# Altium schematic symbol library Symbols.SchLib: 58 symbols
Pins are listed as number, name and electrical type; pins without a type are passive.

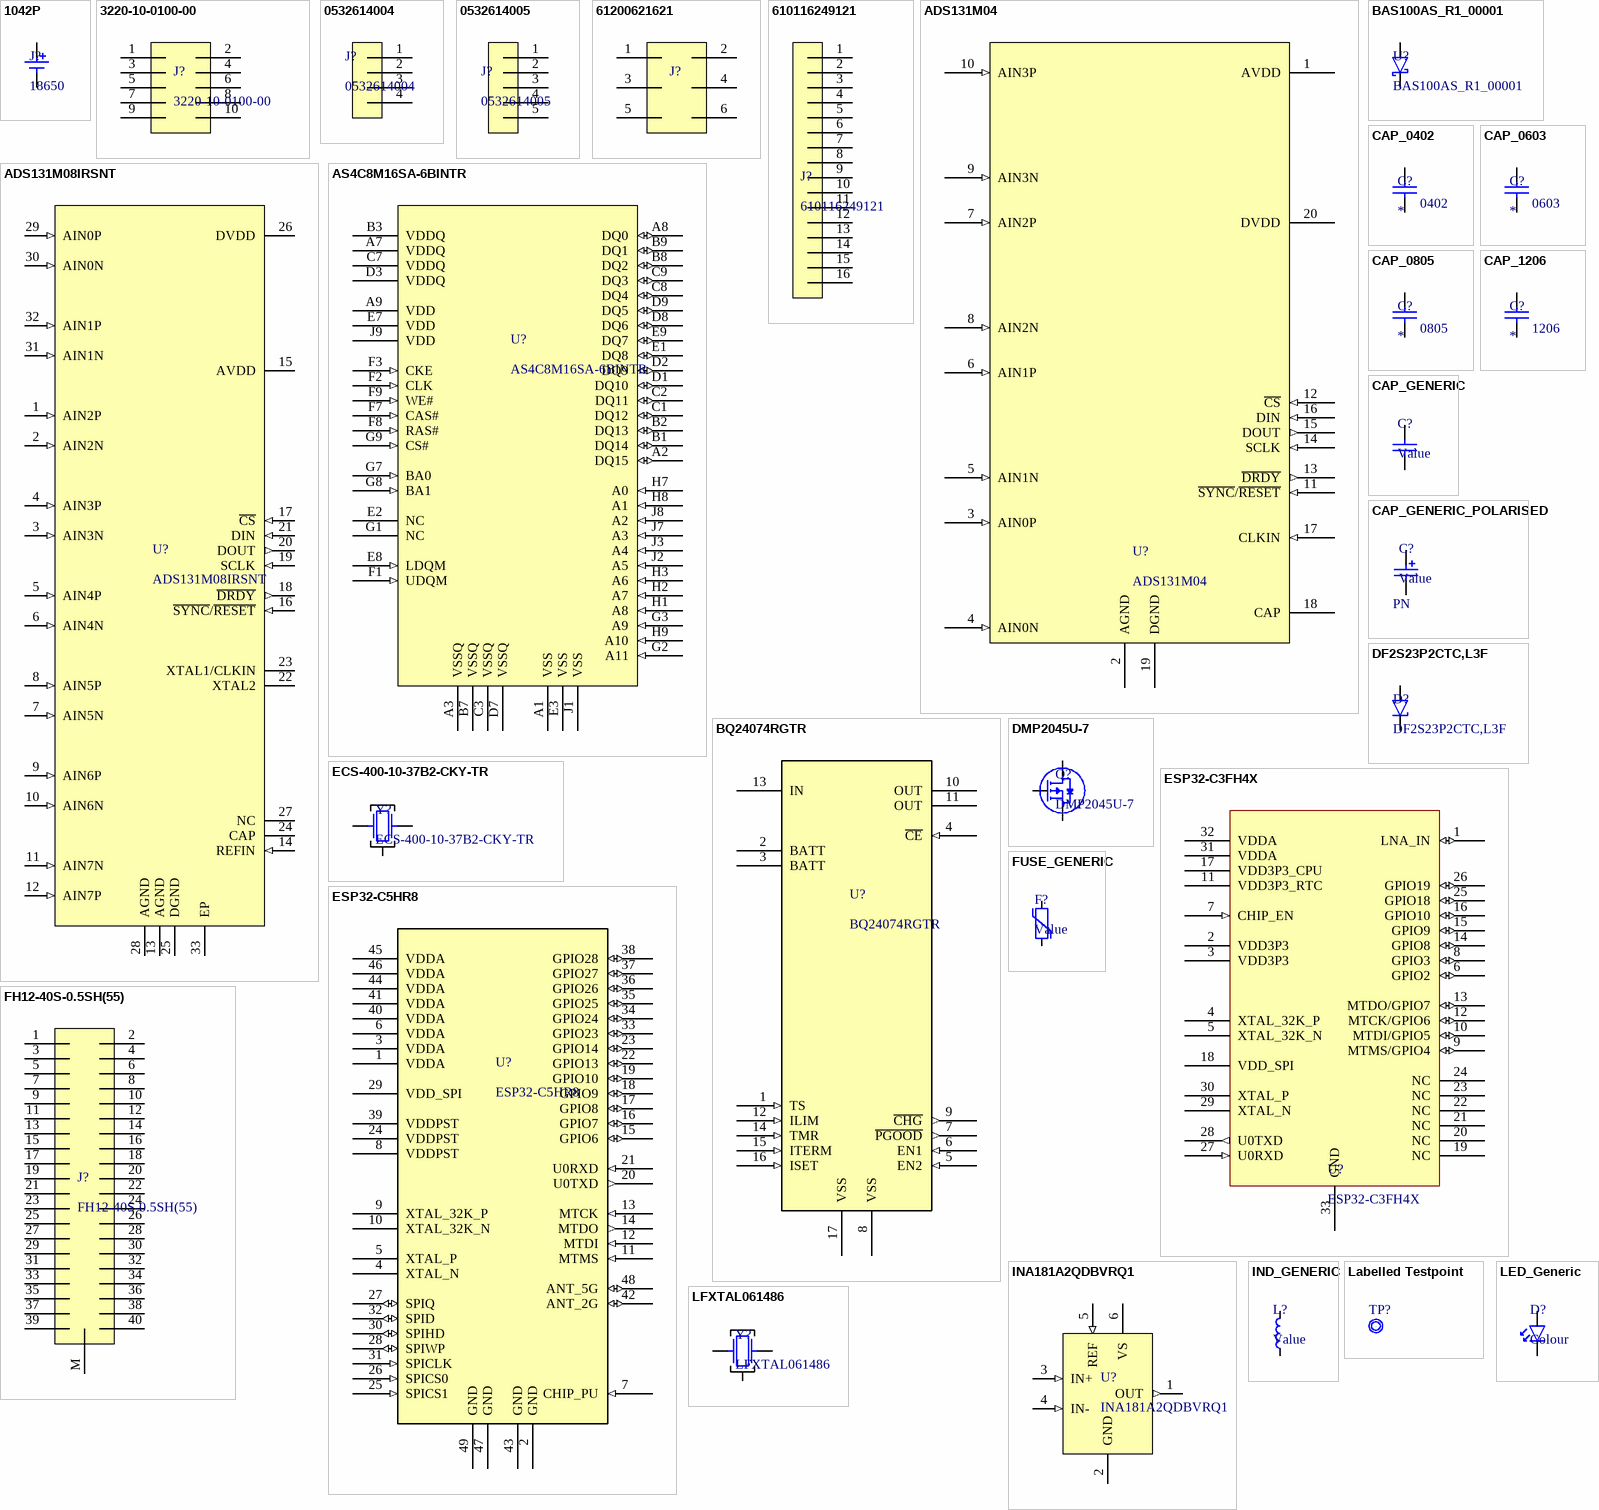
[diagram p0: symbols 1042P to LFXTAL061486]

## 1042P
designator J?, comment 18650
Battery Holder (Open) 18650 1 Cell SMD (SMT) Tab; Supplier 1: DigiKey; Supplier Part Number 1: 36-1042P-ND
footprint 1042P (BATTERY HOLDER 18650 SMD)
pins: 1 (power), 2 (power)

## 3220-10-0100-00
designator J?
Connector Header Through Hole 10 position 0.050" (1.27mm); Supplier 1: DigiKey; Supplier Part Number 1: 1175-1627-ND
footprint 3220-10-0100-00 (Connector Header Through Hole 10 position 0.050" (1.27mm))
pins: 1 2, 2, 3 2, 4 2, 5 2, 6 2, 7 2, 8 2, 9 2, 10 2

## 0532614004
designator J?
Connector Header Surface Mount, Right Angle 4 position 0.049" (1.25mm); Supplier 1: Arrow Electronics; Supplier Part Number 1: 0532614004
footprint 0532614004 (Connector Header Surface Mount, Right Angle 4 position 0.049" (1.25mm))
pins: 1 2, 2, 3 2, 4 2

## 0532614005
designator J?
Connector Header Surface Mount, Right Angle 5 position 0.049" (1.25mm); Supplier 1: DigiKey; Supplier Part Number 1: 900-0532614005DKR-ND
footprint 0532614005 (Connector Header Surface Mount, Right Angle 5 position 0.049" (1.25mm))
pins: 1 2, 2, 3 2, 4 2, 5 2

## 61200621621
designator J?
Connector Header Through Hole 6 position 0.100" (2.54mm); Supplier 1: Newark; Supplier Part Number 1: 61200621621
footprint 61200621621
pins: 1 2, 2, 3 2, 4 2, 5 2, 6 2

## 610116249121
designator J?
Connector Header Surface Mount, Right Angle 16 position 0.100" (2.54mm); Supplier 1: DigiKey; Supplier Part Number 1: 732-6072-6-ND
footprint 610116249121 (Connector Header Surface Mount, Right Angle 16 position 0.100" (2.54mm))
pins: 1 2, 2, 3 2, 4 2, 5 2, 6 2, 7 3, 8 3, 9 3, 10 3, 11 3, 12 3, 13 3, 14 3, 15 3, 16 3

## ADS131M04
designator U?
24 Bit Analog to Digital Converter 4 Input 4 Sigma-Delta 20-TSSOP; Supplier 1: DigiKey; Supplier Part Number 1: 296-ADS131M04IPWRCT-ND
footprint ADS131M04IPW (TSOP, 20-Leads, Body 6.50x4.40mm, Pitch 0.65mm, IPC Medium Density)
pins: 1 AVDD (power), 2 AGND (power), 3 AIN0P (in), 4 AIN0N (in), 5 AIN1N (in), 6 AIN1P (in), 7 AIN2P (in), 8 AIN2N (in), 9 AIN3N (in), 10 AIN3P (in), 11 ~{SYNC}/~{RESET} (in), 12 ~{CS} (in), 13 ~{DRDY} (out), 14 SCLK (in), 15 DOUT (out), 16 DIN (in), 17 CLKIN (in), 18 CAP, 19 DGND (power), 20 DVDD (power)

## ADS131M08IRSNT
designator U?
24 Bit Analog to Digital Converter 8 Input 8 Sigma-Delta 32-QFN (4x4); Supplier 1: DigiKey; Supplier Part Number 1: 296-ADS131M08IRSNTCT-ND
footprint ADS131M08IRSNT (PQFN, 32-Leads, Body 4.00x4.00mm, Pitch 0.40mm, Thermal Pad 2.80x2.80mm, IPC Medium Density)
pins: 1 AIN2P (in), 2 AIN2N (in), 3 AIN3N (in), 4 AIN3P (in), 5 AIN4P (in), 6 AIN4N (in), 7 AIN5N (in), 8 AIN5P (in), 9 AIN6P (in), 10 AIN6N (in), 11 AIN7N (in), 12 AIN7P (in), 13 AGND (power), 14 REFIN (in), 15 AVDD (power), 16 ~{SYNC}/~{RESET} (in), 17 ~{CS} (in), 18 ~{DRDY} (out), 19 SCLK (in), 20 DOUT (out), 21 DIN (in), 22 XTAL2, 23 XTAL1/CLKIN, 24 CAP, 25 DGND (power), 26 DVDD (power), 27 NC, 28 AGND (power), 29 AIN0P (in), 30 AIN0N (in), 31 AIN1N (in), 32 AIN1P (in), 33 EP (power)

## AS4C8M16SA-6BINTR
designator U?
SDRAM Memory IC 128Mbit Parallel 166 MHz 5 ns 54-TFBGA (8x8); Supplier 1: DigiKey; Supplier Part Number 1: 1450-AS4C8M16SA-6BINCT-ND
footprint AS4C8M16SA-6BINTR (BGA, 54-Leads, Body 8.00x8.00mmx1.20mm, Pitch 0.80mm)
ibis AS4C8M16SA-6BIN_8Mx16_SDR_3_3V (Model Description)
pins: A1 VSS (power), A2 DQ15 (io), A3 VSSQ (power), A7 VDDQ (power), A8 DQ0 (io), A9 VDD (power), B1 DQ14 (io), B2 DQ13 (io), B3 VDDQ (power), B7 VSSQ (power), B8 DQ2 (io), B9 DQ1 (io), C1 DQ12 (io), C2 DQ11 (io), C3 VSSQ (power), C7 VDDQ (power), C8 DQ4 (io), C9 DQ3 (io), D1 DQ10 (io), D2 DQ9 (io), D3 VDDQ (power), D7 VSSQ (power), D8 DQ6 (io), D9 DQ5 (io), E1 DQ8 (io), E2 NC (hiz), E3 VSS (power), E7 VDD (power), E8 LDQM (in), E9 DQ7 (io), F1 UDQM (in), F2 CLK (in), F3 CKE (in), F7 CAS# (in), F8 RAS# (in), F9 WE# (in), G1 NC (hiz), G2 A11 (in), G3 A9 (in), G7 BA0 (in), G8 BA1 (in), G9 CS# (in), H1 A8 (in), H2 A7 (in), H3 A6 (in), H7 A0 (in), H8 A1 (in), H9 A10 (in), J1 VSS (power), J2 A5 (in), J3 A4 (in), J7 A3 (in), J8 A2 (in), J9 VDD (power)

## BAS100AS_R1_00001
designator U?
DIODE SCHOTTKY 100V 500MA SOD123; Supplier 1: DigiKey; Supplier Part Number 1: 3757-BAS100AS_R1_00001CT-ND
footprint BAS100AS_R1_00001 (Diode 100 V 500mA Surface Mount SOD-123)
pins: 1 a, 2

## BQ24074RGTR
designator U?
Charger IC Lithium Ion 16-VQFN (3x3); Supplier 1: DigiKey; Supplier Part Number 1: 296-38873-1-ND
footprint BQ24074RGTR (PQFN, 16-Leads, Body 3.00x3.00mm, Pitch 0.50mm, Thermal Pad 1.68x1.68mm, IPC Medium Density)
pins: 1 TS (in), 2 BATT (power), 3 BATT (power), 4 ~{CE} (in), 5 EN2 (in), 6 EN1 (in), 7 ~{PGOOD} (out), 8 VSS (power), 9 ~{CHG} (out), 10 OUT (power), 11 OUT (power), 12 ILIM (in), 13 IN (power), 14 TMR (in), 15 ITERM (in), 16 ISET (in), 17 VSS (power)

## CAP_0402
designator C?  Footprint: 0402
0402 SMD Capacitor
footprint CAP_0402_B (Chip Capacitor, 2-Leads, Body 1.00x0.50mm, IPC Medium Density)
footprint CAP_0402_A (Chip Capacitor, 2-Leads, Body 1.00x0.50mm, IPC Low Density)
pins: 1, 2

## CAP_0603
designator C?  Footprint: 0603
0603 SMD Capacitor
footprint CAP_0603_B (Chip Capacitor, 2-Leads, Body 1.60x0.80mm, IPC Medium Density)
footprint CAP_0603_A (Chip Capacitor, 2-Leads, Body 1.60x0.80mm, IPC Low Density)
pins: 1, 2

## CAP_0805
designator C?  Footprint: 0805
0805 SMD Capacitor
footprint CAP_0805_B (Chip Capacitor, 2-Leads, Body 2.00x1.25mm, IPC Medium Density)
footprint CAP_0805_A (Chip Capacitor, 2-Leads, Body 2.00x1.25mm, IPC Low Density)
pins: 1, 2

## CAP_1206
designator C?  Footprint: 1206
1206 SMD Capacitor
footprint CAP_1206_B (Chip Capacitor, 2-Leads, Body 3.20x1.50mm, IPC Medium Density)
footprint CAP_1206_A (Chip Capacitor, 2-Leads, Body 3.20x1.50mm, IPC Low Density)
pins: 1, 2

## CAP_GENERIC
designator C?, comment Value
Generic capacitor symbol; Tolerance: *; Rating: *
footprint CAP_0402_B (Chip Capacitor, 2-Leads, Body 1.00x0.50mm, IPC Medium Density)
footprint CAP_0603_B (Chip Capacitor, 2-Leads, Body 1.60x0.80mm, IPC Medium Density)
footprint CAP_0805_B (Chip Capacitor, 2-Leads, Body 2.00x1.25mm, IPC Medium Density)
footprint CAP_1206_B (Chip Capacitor, 2-Leads, Body 3.20x1.50mm, IPC Medium Density)
pins: 1, 2

## CAP_GENERIC_POLARISED
designator C?, comment Value  Part Number: PN
Generic polarised capacitor symbol
pins: 1, 2

## DF2S23P2CTC,L3F
designator D?
35.7V Clamp 14A (8/20µs) Ipp Tvs Diode Surface Mount CST2C; Supplier 1: Avnet; Supplier Part Number 1: DF2S23P2CTC,L3F
footprint DF2S23P2CTC,L3F (DFN, 2-Leads, Body 1.60x0.80mm, Pitch 1.15mm, IPC Medium Density)
pins: 1 a, 2

## DMP2045U-7
designator Q?
P-Channel 20 V 4.3A (Ta) 800mW (Ta) Surface Mount SOT-23-3; Supplier 1: DigiKey; Supplier Part Number 1: DMP2045U-7DICT-ND
footprint DMP2045U-7 (SOT23, 3-Leads, Body 2.90x2.40mm, Pitch 0.90mm, IPC Medium Density)
pins: 1 G, 2 S, 3 D

## ECS-400-10-37B2-CKY-TR
designator Y?
40 MHz ±10ppm Crystal 10pF 40 Ohms 4-SMD, No Lead; Supplier 1: Future Electronics; Supplier Part Number 1: ECS-400-10-37B2-CKY-TR
footprint ECS-400-10-37B2-CKY-TR
pins: 1 IO, 2 GND, 3 IO, 4 GND

## ESP32-C3FH4X
designator U?
IC RF TxRx + MCU Bluetooth, WiFi 802.11b/g/n, Bluetooth v5.0 32-VFQFN Exposed Pad; Supplier 1: DigiKey; Supplier Part Number 1: 1965-ESP32-C3FH4XCT-ND
footprint ESP32-C3FH4X (PQFN, 32-Leads, Body 5.00x5.00mm, Pitch 0.50mm, Thermal Pad 3.70x3.70mm, IPC Medium Density)
pins: 1 LNA_IN (io), 2 VDD3P3 (power), 3 VDD3P3 (power), 4 XTAL_32K_P, 5 XTAL_32K_N, 6 GPIO2 (io), 7 CHIP_EN (in), 8 GPIO3 (io), 9 MTMS/GPIO4 (io), 10 MTDI/GPIO5 (io), 11 VDD3P3_RTC (power), 12 MTCK/GPIO6 (io), 13 MTDO/GPIO7 (io), 14 GPIO8 (io), 15 GPIO9 (io), 16 GPIO10 (io), 17 VDD3P3_CPU (power), 18 VDD_SPI (power), 19 NC, 20 NC, 21 NC, 22 NC, 23 NC, 24 NC, 25 GPIO18 (io), 26 GPIO19 (io), 27 U0RXD (in), 28 U0TXD (out), 29 XTAL_N, 30 XTAL_P, 31 VDDA (power), 32 VDDA (power), 33 GND (power)

## ESP32-C5HR8
designator U?
IC RF TxRx + MCU Bluetooth, WiFi 802.11b/g/n/ax, Bluetooth v5.0 2.4GHz, 5GHz 48-VFQFN Exposed Pad; Supplier 1: DigiKey; Supplier Part Number 1: 1904-ESP32-C5HR8CT-ND
footprint ESP32-C5HR8
pins: 1 VDDA (power), 2 GND (power), 3 VDDA (power), 4 XTAL_N, 5 XTAL_P, 6 VDDA (power), 7 CHIP_PU (in), 8 VDDPST (power), 9 XTAL_32K_P, 10 XTAL_32K_N, 11 MTMS (in), 12 MTDI (in), 13 MTCK (in), 14 MTDO (out), 15 GPIO6 (io), 16 GPIO7 (io), 17 GPIO8 (io), 18 GPIO9 (io), 19 GPIO10 (io), 20 U0TXD (out), 21 U0RXD (in), 22 GPIO13 (io), 23 GPIO14 (io), 24 VDDPST (power), 25 SPICS1 (in), 26 SPICS0 (in), 27 SPIQ (io), 28 SPIWP (io), 29 VDD_SPI (power), 30 SPIHD (io), 31 SPICLK (in), 32 SPID (io), 33 GPIO23 (io), 34 GPIO24 (io), 35 GPIO25 (io), 36 GPIO26 (io), 37 GPIO27 (io), 38 GPIO28 (io), 39 VDDPST (power), 40 VDDA (power), 41 VDDA (power), 42 ANT_2G (io), 43 GND (power), 44 VDDA (power), 45 VDDA (power), 46 VDDA (power), 47 GND (power), 48 ANT_5G (io), 49 GND (power)

## FH12-40S-0.5SH(55)
designator J?
40 Position FFC, FPC Connector Contacts, Bottom 0.020" (0.50mm) Surface Mount, Right Angle; Supplier 1: Future Electronics; Supplier Part Number 1: FH12-40S-0.5SH(55)
footprint FH12-40S-0.5SH(55) (40 Position FFC, FPC Connector Contacts, Bottom 0.020" (0.50mm) Surface Mount, Right Angle)
pins: 1 2, 2, 3 2, 4 2, 5 2, 6 2, 7 3, 8 3, 9 3, 10 3, 11 3, 12 3, 13 3, 14 3, 15 3, 16 3, 17, 18 3, 19 3, 20 3, 21 5, 22 5, 23 5, 24 5, 25 5, 26 5, 27 5, 28 5, 29 5, 30 5, 31 5, 32 5, 33 5, 34 5, 35 5, 36 5, 37 5, 38 5, 39 5, 40 5, M 5

## FUSE_GENERIC
designator F?, comment Value
Generic Fuse Symbol
pins: 1 a, 2 a

## INA181A2QDBVRQ1
designator U?
Current Sense Amplifier 1 Circuit Rail-to-Rail SOT-23-6; Supplier 1: DigiKey; Supplier Part Number 1: 296-INA181A2QDBVRQ1CT-ND
footprint INA181A2QDBVRQ1 (SOT23, 6-Leads, Body 2.90x2.80mm, Pitch 0.95mm, IPC Medium Density)
pins: 1 OUT (out), 2 GND (power), 3 IN+ (in), 4 IN- (in), 5 REF (in), 6 VS (power)

## IND_GENERIC
designator L?, comment Value
Generic inductor symbol
pins: 1 a, 2 a

## Labelled Testpoint
designator TP?, comment Net  (value not drawn)
Symbol for a labelled testpoint
footprint Labelled Testpoint (2mm Diameter testpoint with silkscreen for labelling)
pins: 1

## LED_Generic
designator D?, comment Colour
pins: 1, 2

## LFXTAL061486
designator Y?
8.192 MHz ±30ppm Crystal 10pF 150 Ohms 4-SMD, No Lead; Supplier 1: DigiKey; Supplier Part Number 1: 1923-LFXTAL061486CT-ND
footprint LFXTAL061486 (8.192 MHz ±30ppm Crystal 10pF 150 Ohms 4-SMD, No Lead)
pins: 1 IO, 2 GND, 3 IO, 4 GND

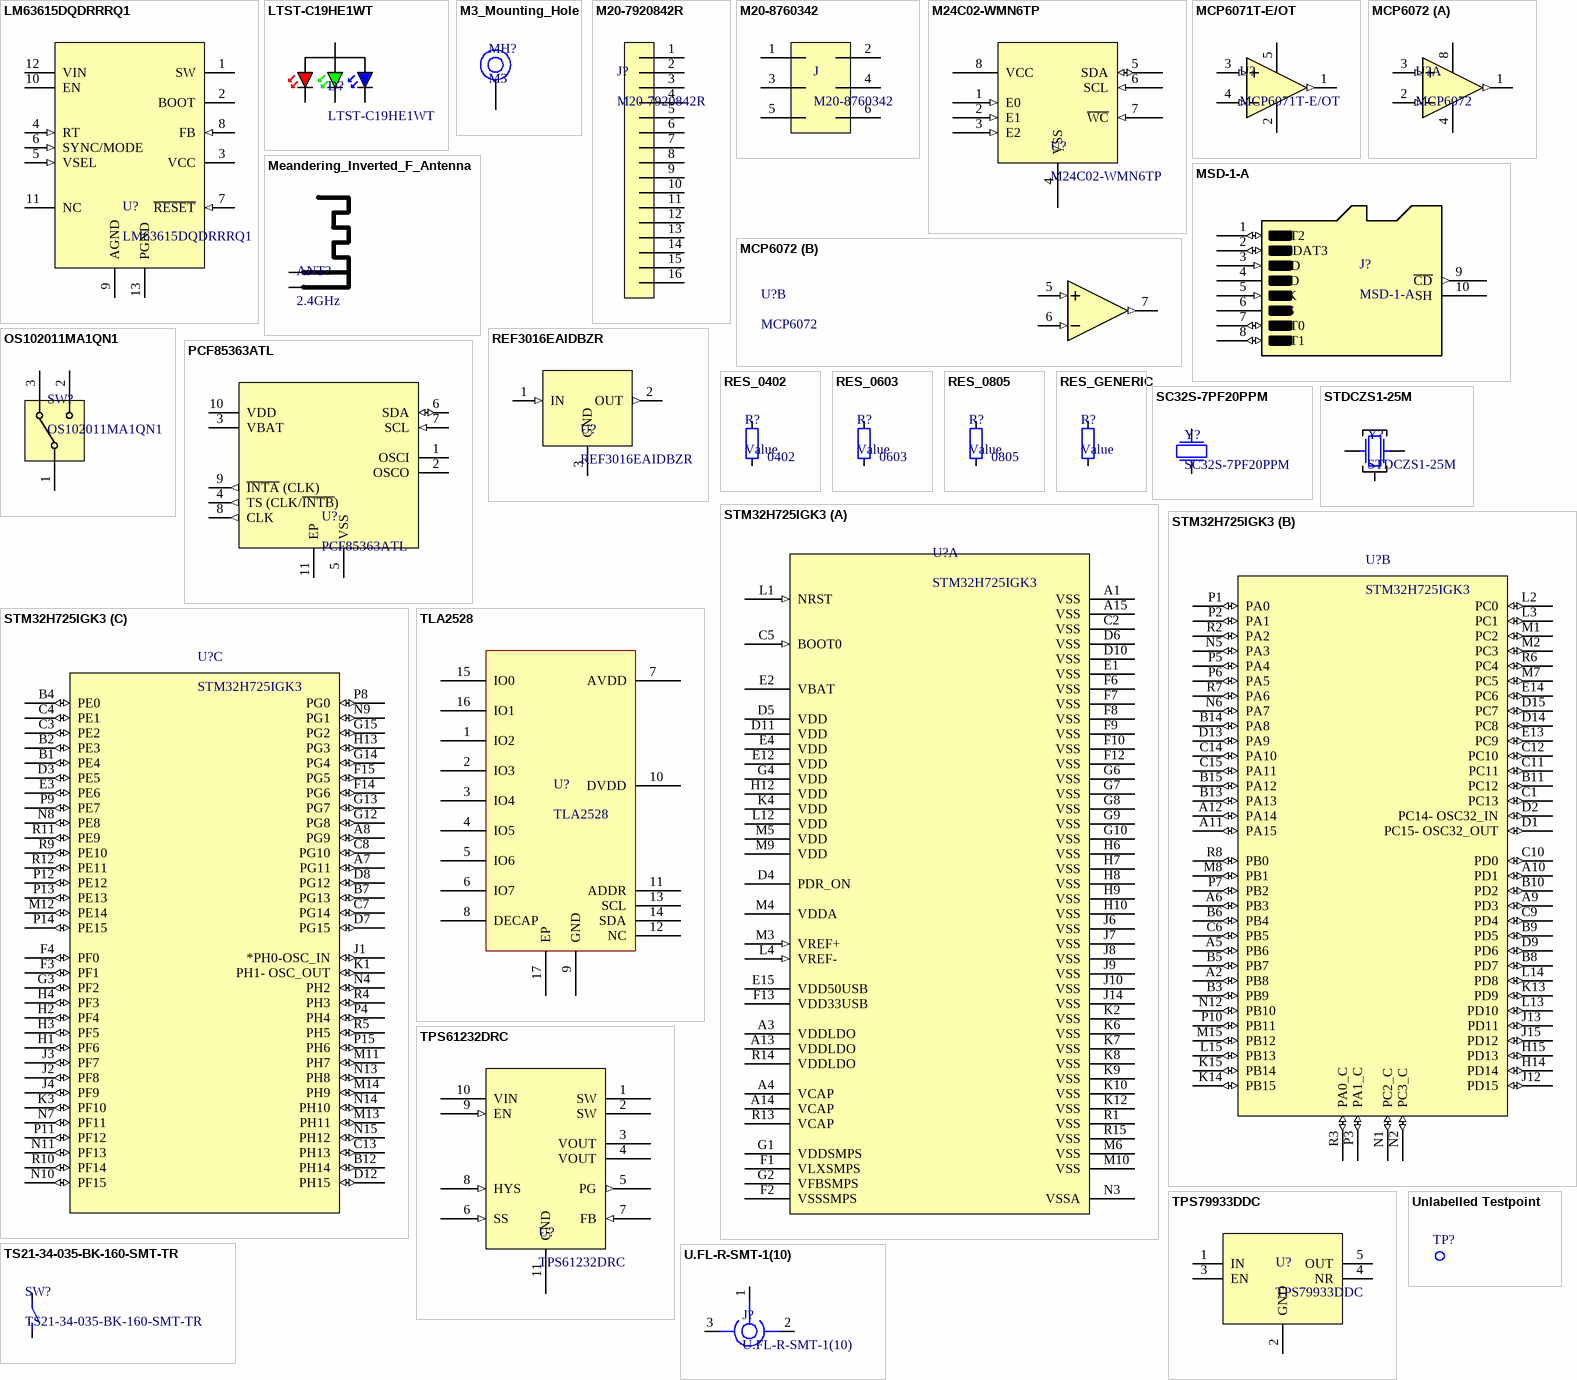
[diagram p1: symbols LM63615DQDRRRQ1 to Unlabelled Testpoint]

## LM63615DQDRRRQ1
designator U?
Buck Switching Regulator IC Positive Adjustable 1V 1 Output 1.5A 12-WFDFN Exposed Pad; Supplier 1: DigiKey; Supplier Part Number 1: 296-LM63615DQDRRRQ1DKR-ND
footprint LM63615DQDRRRQ1 (SON, 12-Leads, Body 3.00x3.00mm, Pitch 0.50mm, Thermal Pad 2.50x1.30mm, IPC Medium Density)
pins: 1 SW (power), 2 BOOT (power), 3 VCC (power), 4 RT (in), 5 VSEL (in), 6 SYNC/MODE (in), 7 ~{RESET} (in), 8 FB (in), 9 AGND (power), 10 EN (power), 11 NC, 12 VIN (power), 13 PGND (power)

## LTST-C19HE1WT
designator D?
Red, Green, Blue (RGB) 624nm Red, 525nm Green, 470nm Blue LED Indication - Discrete 2.1V Red, 3.35V Green, 3.35V Blue 0606 (1616 Metric); Supplier 1: Arrow Electronics; Supplier Part Number 1: LTST-C19HE1WT
footprint LTST-C19HE1WT (Red, Green, Blue (RGB) 624nm Red, 525nm Green, 470nm Blue LED Indication - Discrete 2.1V Red, 3.35V Green, 3.35V Blue 0606 (1616 Metric))
pins: 1, 2, 3, 4

## M3_Mounting_Hole
designator MH?, comment M3
M3 Mounting Hole
footprint M3_Mounting_Hole (Mounting Hole for M3)
pins: 1

## M20-7920842R
designator J?
16 Position Receptacle Connector 0.100" (2.54mm) Surface Mount, Right Angle Gold; Supplier 1: DigiKey; Supplier Part Number 1: 952-3179-1-ND
footprint M20-7920842R (16 Position Receptacle Connector 0.100" (2.54mm) Surface Mount, Right Angle Gold)
pins: 1 2, 2, 3 2, 4 2, 5 2, 6 2, 7 3, 8 3, 9 3, 10 3, 11 3, 12 3, 13 3, 14 3, 15 3, 16 3

## M20-8760342
designator J
Connector Header Surface Mount 6 position 0.100" (2.54mm); Supplier 1: DigiKey; Supplier Part Number 1: 952-1922-ND
footprint M20-8760342 (Connector Header Surface Mount 6 position 0.100" (2.54mm))
footprint M20-8760342 (Connector Header Surface Mount 6 position 0.100" (2.54mm))
pins: 1 2, 2, 3 2, 4 2, 5 2, 6 2

## M24C02-WMN6TP
designator U?
IC EEPROM 2KBIT I2C 400KHZ 8SOIC; Supplier 1: Arrow Electronics; Supplier Part Number 1: M24C02-WMN6TP
footprint M24C02-WMN6TP (SOIC, 8-Leads, Body 4.90x3.90mm, Pitch 1.27mm, IPC Medium Density)
pins: 1 E0 (in), 2 E1 (in), 3 E2 (in), 4 VSS (power), 5 SDA (io), 6 SCL (in), 7 ~{WC} (in), 8 VCC (power)

## MCP6071T-E/OT
designator U?
Standard (General Purpose) Amplifier 1 Circuit Rail-to-Rail SOT-23-5; Supplier 1: Arrow Electronics; Supplier Part Number 1: MCP6071T-E/OT
footprint MCP6071T-E/OT (SOT23, 5-Leads, Body 2.90x2.70mm, Pitch 0.95mm, IPC Medium Density)
pins: 1 VOUT (out), 2 VSS (power), 3 VIN+ (in), 4 VIN- (in), 5 VDD (power)

## MCP6072
designator U?
IC OPAMP GP 2 CIRCUIT 8SOIC; Supplier 1: Avnet; Supplier Part Number 1: MCP6072-E/SN
part A pins: 1 VOUTA (out), 2 VINA- (in), 3 VINA+ (in), 4 VSS (power), 8 VDD (power)
part B pins: 5 VINB+ (in), 6 VINB- (in), 7 VOUTB (out)

## Meandering_Inverted_F_Antenna
designator ANT?, comment 2.4GHz  (net tie, no BOM)
2.4GHz meandering inverted F antenna. Taken from Texas Instruments AN043.
footprint Meandering_Inverted_F_Antenna
pins: 1 GND, 2 FEED

## MSD-1-A
designator J?
9 (8 + 1) Position Card Connector microSD™ Surface Mount, Right Angle Gold; Supplier 1: Arrow Electronics; Supplier Part Number 1: MSD-1-A
footprint MSD-1-A
pins: 1 DAT2 (io), 2 CD/DAT3 (io), 3 CMD (in), 4 VDD (power), 5 CLK (in), 6 VSS (power), 7 DAT0 (io), 8 DAT1 (io), 9 ~{CD} (out), 10 SH

## OS102011MA1QN1
designator SW?
SWITCH SLIDE SPDT 100MA 12V
footprint OS102011MA1QN1 (Slide Switch SPDT Through Hole, Right Angle)
pins: 1 0, 2 0, 3 0

## PCF85363ATL
designator U?
Real Time Clock (RTC) IC Clock/Calendar 64B I2C, 2-Wire Serial 10-XFDFN Exposed Pad; Supplier 1: Arrow Electronics; Supplier Part Number 1: PCF85363ATL/AX
footprint PCF85363ATL/AX (Real Time Clock (RTC) IC Clock/Calendar 64B I2C, 2-Wire Serial 10-XFDFN Exposed Pad)
pins: 1 OSCI, 2 OSCO, 3 VBAT (power), 4 TS (CLK/~{INTB}) (out), 5 VSS (power), 6 SDA (io), 7 SCL (in), 8 CLK (out), 9 ~{INTA} (CLK) (out), 10 VDD (power), 11 EP (power)

## REF3016EAIDBZR
designator U?
Series Voltage Reference IC Fixed 1.65V V ±0.1% 25 mA SOT-23-3; Supplier 1: DigiKey; Supplier Part Number 1: 296-REF3016EAIDBZRCT-ND
footprint REF3016EAIDBZR (SOT23, 3-Leads, Body 2.92x2.37mm, Pitch 0.95mm, IPC Medium Density)
pins: 1 IN (in), 2 OUT (out), 3 GND (power)

## RES_0402
designator R?, comment Value  Footprint: 0402
0402 SMD Resistor
footprint RES_0402_A (Chip Resistor, 2-Leads, Body 1.00x0.50mm, IPC Low Density)
footprint RES_0402_B (Chip Resistor, 2-Leads, Body 1.00x0.50mm, IPC Medium Density)
pins: 1 a, 2 a

## RES_0603
designator R?, comment Value  Footprint: 0603
0603 SMD Resistor
footprint RES_0603_A (Chip Resistor, 2-Leads, Body 1.60x0.80mm, IPC Low Density)
footprint RES_0603_B (Chip Resistor, 2-Leads, Body 1.60x0.80mm, IPC Medium Density)
pins: 1 a, 2 a

## RES_0805
designator R?, comment Value  Footprint: 0805
0805 SMD Resistor
footprint RES_0805_B (Chip Resistor, 2-Leads, Body 2.00x1.25mm, IPC Medium Density)
footprint RES_0805_A (Chip Resistor, 2-Leads, Body 2.00x1.25mm, IPC Low Density)
pins: 1 a, 2 a

## RES_GENERIC
designator R?, comment Value
Generic resistor symbol
footprint RES_0402_B (Chip Resistor, 2-Leads, Body 1.00x0.50mm, IPC Medium Density)
footprint RES_0603_B (Chip Resistor, 2-Leads, Body 1.60x0.80mm, IPC Medium Density)
footprint RES_0805_B (Chip Resistor, 2-Leads, Body 2.00x1.25mm, IPC Medium Density)
pins: 1 a, 2 a

## SC32S-7PF20PPM
designator Y?
32.768 kHz ±20ppm Crystal 7pF 70 kOhms 2-SMD, No Lead; Supplier 1: Arrow Electronics; Supplier Part Number 1: SC32S-7PF20PPM
footprint SC32S-7PF20PPM (32.768 kHz ±20ppm Crystal 7pF 70 kOhms 2-SMD, No Lead)
pins: 1, 2

## STDCZS1-25M
designator Y?
25 MHz ±15ppm Crystal 8pF 80 Ohms 4-SMD, No Lead; Supplier 1: DigiKey; Supplier Part Number 1: 644-STDCZS1-25MDKR-ND
footprint STDCZS1-25M (25 MHz ±15ppm Crystal 8pF 80 Ohms 4-SMD, No Lead)
pins: 1 IO, 2 GND, 3 IO, 4 GND

## STM32H725IGK3
designator U?
High-performance and DSP with DP-FPU, Arm Cortex-M7 MCU with 1 MByte Flash, 564 KBytes RAM, 550 MHz CPU, L1 cache, external memory interface, SMPS, subset of peripherals; Manufacturer_Name: STMicroelectronics; Manufacturer_Part_Number: STM32H725IGK3; RefDes: RefDes; Type: Type; Supplier 1: Future Electronics; Supplier Part Number 1: STM32H725IGK3
footprint STM32H725IGK3
ibis stm32h725_730_735_ufbga176 (Model Description)
part A pins: A1 VSS (power), A3 VDDLDO (power), A4 VCAP, A13 VDDLDO (power), A14 VCAP, A15 VSS (power), C2 VSS (power), C5 BOOT0 (in), D4 PDR_ON (power), D5 VDD (power), D6 VSS (power), D10 VSS (power), D11 VDD (power), E1 VSS (power), E2 VBAT (power), E4 VDD (power), E12 VDD (power), E15 VDD50USB (power), F1 VLXSMPS (power), F2 VSSSMPS (power), F6 VSS (power), F7 VSS (power), F8 VSS (power), F9 VSS (power), F10 VSS (power), F12 VSS (power), F13 VDD33USB (power), G1 VDDSMPS (power), G2 VFBSMPS (power), G4 VDD (power), G6 VSS (power), G7 VSS (power), G8 VSS (power), G9 VSS (power), G10 VSS (power), H6 VSS (power), H7 VSS (power), H8 VSS (power), H9 VSS (power), H10 VSS (power), H12 VDD (power), J6 VSS (power), J7 VSS (power), J8 VSS (power), J9 VSS (power), J10 VSS (power), J14 VSS (power), K2 VSS (power), K4 VDD (power), K6 VSS (power), K7 VSS (power), K8 VSS (power), K9 VSS (power), K10 VSS (power), K12 VSS (power), L1 NRST (in), L4 VREF- (in), L12 VDD (power), M3 VREF+ (in), M4 VDDA (power), M5 VDD (power), M6 VSS (power), M9 VDD (power), M10 VSS (power), N3 VSSA (power), R1 VSS (power), R13 VCAP, R14 VDDLDO (power), R15 VSS (power)
part B pins: A2 PB8 (io), A5 PB6 (io), A6 PB3 (io), A9 PD3 (io), A10 PD1 (io), A11 PA15 (io), A12 PA14 (io), B3 PB9 (io), B5 PB7 (io), B6 PB4 (io), B8 PD7 (io), B9 PD5 (io), B10 PD2 (io), B11 PC12 (io), B13 PA13 (io), B14 PA8 (io), B15 PA12 (io), C1 PC13 (io), C6 PB5 (io), C9 PD4 (io), C10 PD0 (io), C11 PC11 (io), C12 PC10 (io), C14 PA10 (io), C15 PA11 (io), D1 PC15- OSC32_OUT (io), D2 PC14- OSC32_IN (io), D9 PD6 (io), D13 PA9 (io), D14 PC8 (io), D15 PC7 (io), E13 PC9 (io), E14 PC6 (io), H14 PD14 (io), H15 PD13 (io), J12 PD15 (io), J13 PD11 (io), J15 PD12 (io), K13 PD9 (io), K14 PB15 (io), K15 PB14 (io), L2 PC0 (io), L3 PC1 (io), L13 PD10 (io), L14 PD8 (io), L15 PB13 (io), M1 PC2 (io), M2 PC3 (io), M7 PC5 (io), M8 PB1 (io), M15 PB12 (io), N1 PC2_C (io), N2 PC3_C (io), N5 PA3 (io), N6 PA7 (io), N12 PB10 (io), P1 PA0 (io), P2 PA1 (io), P3 PA1_C (io), P5 PA4 (io), P6 PA5 (io), P7 PB2 (io), P10 PB11 (io), R2 PA2 (io), R3 PA0_C (io), R6 PC4 (io), R7 PA6 (io), R8 PB0 (io)
part C pins: A7 PG11 (io), A8 PG9 (io), B1 PE4 (io), B2 PE3 (io), B4 PE0 (io), B7 PG13 (io), B12 PH14 (io), C3 PE2 (io), C4 PE1 (io), C7 PG14 (io), C8 PG10 (io), C13 PH13 (io), D3 PE5 (io), D7 PG15 (io), D8 PG12 (io), D12 PH15 (io), E3 PE6 (io), F3 PF1 (io), F4 PF0 (io), F14 PG6 (io), F15 PG5 (io), G3 PF2 (io), G12 PG8 (io), G13 PG7 (io), G14 PG4 (io), G15 PG2 (io), H1 PF6 (io), H2 PF4 (io), H3 PF5 (io), H4 PF3 (io), H13 PG3 (io), J1 *PH0-OSC_IN (io), J2 PF8 (io), J3 PF7 (io), J4 PF9 (io), K1 PH1- OSC_OUT (io), K3 PF10 (io), M11 PH7 (io), M12 PE14 (io), M13 PH11 (io), M14 PH9 (io), N4 PH2 (io), N7 PF11 (io), N8 PE8 (io), N9 PG1 (io), N10 PF15 (io), N11 PF13 (io), N13 PH8 (io), N14 PH10 (io), N15 PH12 (io), P4 PH4 (io), P8 PG0 (io), P9 PE7 (io), P11 PF12 (io), P12 PE12 (io), P13 PE13 (io), P14 PE15 (io), P15 PH6 (io), R4 PH3 (io), R5 PH5 (io), R9 PE10 (io), R10 PF14 (io), R11 PE9 (io), R12 PE11 (io)

## TLA2528
designator U?
12 Bit Analog to Digital Converter 8 Input 1 SAR 16-WQFN (3x3); Supplier 1: Mouser; Supplier Part Number 1: 595-TLA2528IRTER
footprint TLA2528
pins: 1 IO2, 2 IO3, 3 IO4, 4 IO5, 5 IO6, 6 IO7, 7 AVDD, 8 DECAP, 9 GND, 10 DVDD, 11 ADDR, 12 NC, 13 SCL, 14 SDA, 15 IO0, 16 IO1, 17 EP

## TPS61232DRC
designator U?
Boost Switching Regulator IC Positive Fixed 5V 1 Output 5A (Switch) 10-VFDFN Exposed Pad; Supplier 1: DigiKey; Supplier Part Number 1: 296-44498-6-ND
footprint TPS61232DRCR (Boost Switching Regulator IC Positive Fixed 5V 1 Output 5A (Switch) 10-VFDFN Exposed Pad)
pins: 1 SW (power), 2 SW (power), 3 VOUT (power), 4 VOUT (power), 5 PG (out), 6 SS (in), 7 FB (in), 8 HYS (in), 9 EN (in), 10 VIN (power), 11 GND (power)

## TPS79933DDC
designator U?
Linear Voltage Regulator IC Positive Fixed 1 Output 200mA SOT-23-THIN; Supplier 1: DigiKey; Supplier Part Number 1: 296-17783-6-ND
footprint TPS79933DDCR (SOT23, 3-Leads, Body 2.90x2.80mm, Pitch 0.95mm, IPC Medium Density)
pins: 1 IN (power), 2 GND (power), 3 EN (power), 4 NR, 5 OUT (power)

## TS21-34-035-BK-160-SMT-TR
designator SW?
Tactile Switch SPST-NO Top Actuated Surface Mount; Supplier 1: DigiKey; Supplier Part Number 1: 2223-TS21-34-035-BK-160-SMT-TRDKR-ND
footprint TS21-34-035-BK-160-SMT-TR (Tactile Switch SPST-NO Top Actuated Surface Mount)
pins: 1, 2

## U.FL-R-SMT-1(10)
designator J?
U.FL (UMCC) Connector Receptacle, Male Pin 50 Ohms Surface Mount Solder; Supplier 1: Future Electronics; Supplier Part Number 1: U.FL-R-SMT-1(10)
footprint U.FL-R-SMT-1(80) (U.FL (UMCC) Connector Receptacle, Male Pin 50 Ohms Surface Mount Solder)
pins: 1 SIG, 2 GND, 3 GND

## Unlabelled Testpoint
designator TP?, comment Net  (value not drawn)
Symbol for an unlabelled testpoint
footprint Unlabelled Testpoint (1.5mm Diameter testpoint)
pins: 1

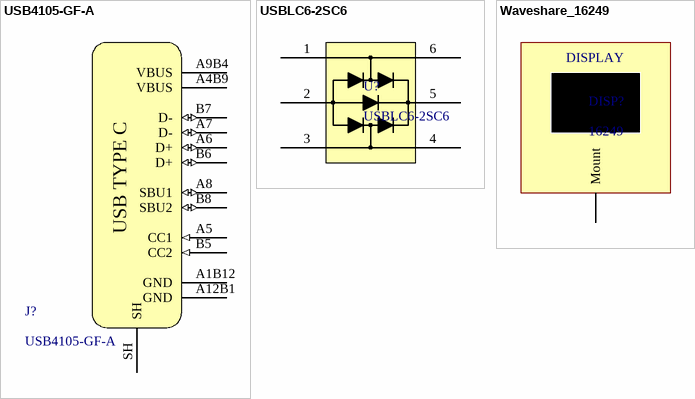
[diagram p2: symbols USB4105-GF-A to Waveshare_16249]

## USB4105-GF-A
designator J?
USB-C (USB TYPE-C) USB 2.0 Receptacle Connector 24 (16+8 Dummy) Position Surface Mount, Right Angle; Through Hole; Supplier 1: Future Electronics; Supplier Part Number 1: USB4105-GF-A
footprint USB4105-GF-A (USB-C (USB TYPE-C) USB 2.0 Receptacle Connector 24 (16+8 Dummy) Position Surface Mount, Right Angle; Through Hole)
pins: A1B12 GND (power), A4B9 VBUS (power), A5 CC1 (in), A6 D+ (io), A7 D- (io), A8 SBU1 (io), A9B4 VBUS (power), A12B1 GND (power), B5 CC2 (in), B6 D+ (io), B7 D- (io), B8 SBU2 (io), SH
text: USB TYPE C

## USBLC6-2SC6
designator U?
17V Clamp 5A (8/20µs) Ipp Tvs Diode Surface Mount SOT-23-6; Supplier 1: Arrow Electronics; Supplier Part Number 1: USBLC6-2SC6
footprint USBLC6-2SC6 (SOT23, 6-Leads, Body 2.93x2.80mm, Pitch 0.95mm, IPC Medium Density)
pins: 1 IO1, 2 GND, 3 IO2, 4 IO2, 5 VBUS, 6 IO1

## Waveshare_16249
designator DISP?, comment 16249
Connector for Waveshare 16249 Display.
footprint Waveshare_16249
pins: M Mount
text: DISPLAY